# Altium footprint library B39431B3710U410.PcbLib: 1 footprints
Each footprint in its own frame and in the unit in brackets; x right, y up, seen from the top. Pads: shape width x height; smd on the part's side, far side on the other; paste and mask are expansions set on the pad; w line width, h text height; cw(c..) or ccw(c..) is an arc to the next point about the centre after c.
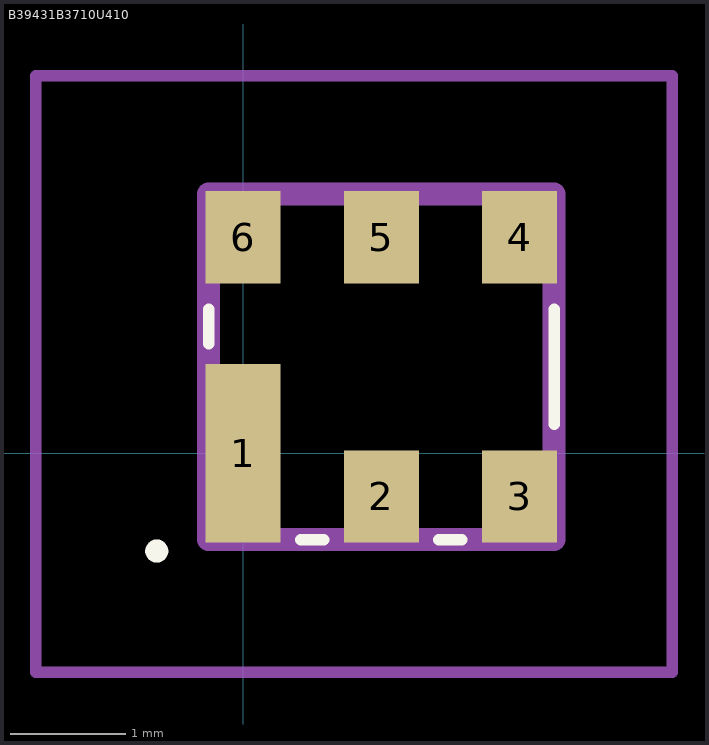
[diagram p0: the footprint, top view; thin cyan lines are the x and y axes]

## B39431B3710U410 [mm]
pads (6):
  rect 0.65x1.55 smd: 1(0,0)
  rect 0.65x0.8 smd: 2(1.2,-0.375) 3(2.4,-0.375) 4(2.4,1.875) 5(1.2,1.875) 6(0,1.875)
Top Overlay:
  lines w0.1: -0.3,0.95 -0.3,1.25 ; 0.5,-0.75 0.7,-0.75 ; 1.7,-0.75 1.9,-0.75 ; 2.7,0.25 2.7,1.25 ; -0.8,-0.85 -0.8,-0.85 ; -0.8,-0.85 ccw(c-0.75,-0.85) -0.7,-0.85 ; -0.8,-0.85 cw(c-0.75,-0.85) -0.7,-0.85 ; -0.7,-0.85 -0.7,-0.85
Mechanical 15:
  lines w0.2: -0.3,-0.75 2.7,-0.75 2.7,2.25 -0.3,2.25 -0.3,-0.75
Mechanical 20:
  lines w0.1: -1.8,-1.9 3.725,-1.9 3.725,3.275 -1.8,3.275 -1.8,-1.9